# Altium schematic symbol library Mosfet.SchLib: 175 symbols (part 3 of 4)
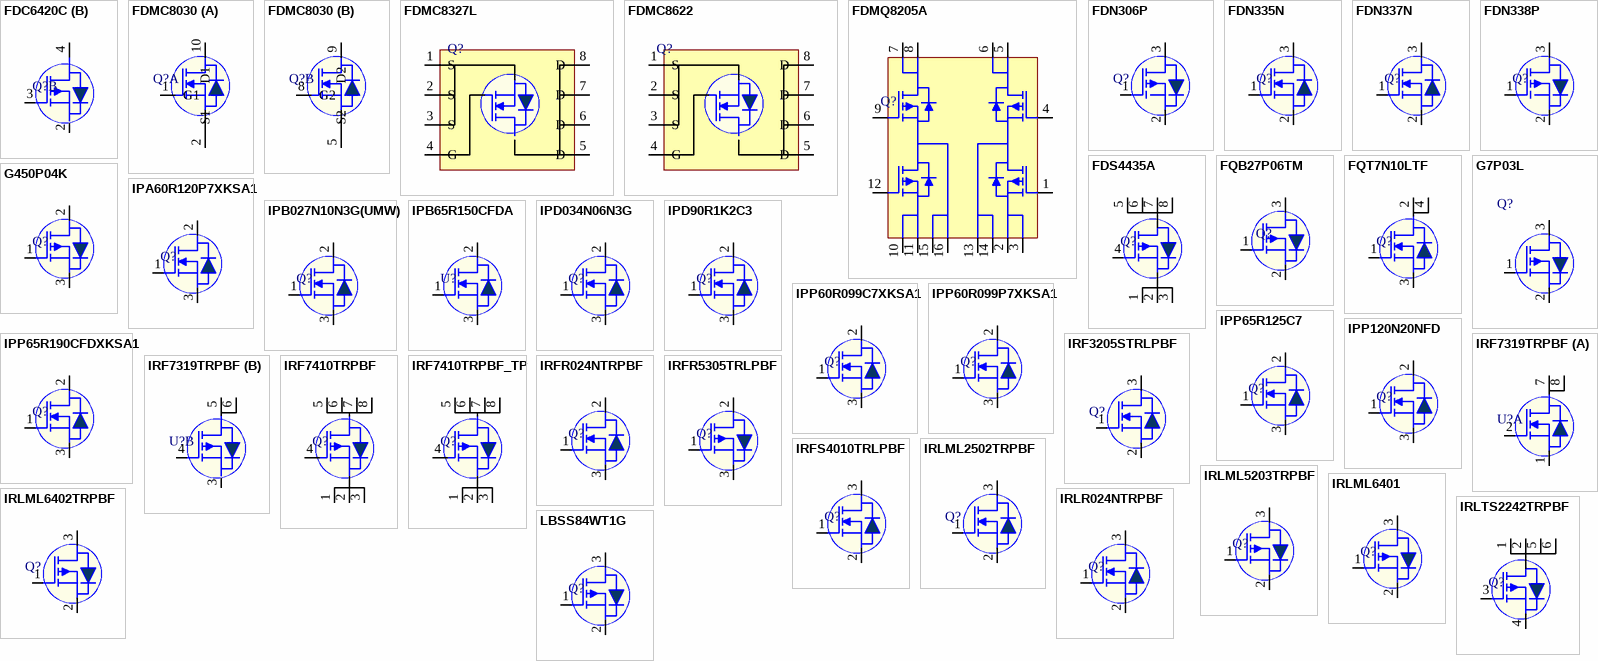
[diagram p6: symbols FDC6420C to LBSS84WT1G]

## FQT7N10LTF
designator Q?
MOSFET N-CH 100V 1.7A SOT223-4; Manufacturer: ON Semiconductor / Fairchild; Manufacturer Part Number: FQT7N10LTF; Item Type: MOSFETs; Supplier: Future Electronics; Supplier Part Number: 9201641; RoHS: Yes; Stock: 188000; Pricing: 4000=0.24, 8000=0.235, 12000=0.235, 16000=0.23, 20000=0.225 (USD); ComponentLink1URL: https://datasheet.ciiva.com/15137/getdatasheetpartid-60091-15137237.pdf?src-supplier=Verical; ComponentLink1Description: https://datasheet.ciiva.com/15137/getdatasheetpartid-60091-15137237.pdf?src-supplier=Verical; ComponentLink2URL: https://datasheet.ciiva.com/8114/fqt7n10l-8114544.pdf?src-supplier=Avnet; ComponentLink2Description: https://datasheet.ciiva.com/8114/fqt7n10l-8114544.pdf?src-supplier=Avnet; ComponentLink3URL: https://datasheet.ciiva.com/4442/fqt7n10l-112492-4442638.pdf?src-supplier=Mouser; ComponentLink3Description: https://datasheet.ciiva.com/4442/fqt7n10l-112492-4442638.pdf?src-supplier=Mouser; ComponentLink4URL: https://datasheet.ciiva.com/27051/933775-27051022.pdf?src-supplier=Jameco; ComponentLink4Description: https://datasheet.ciiva.com/27051/933775-27051022.pdf?src-supplier=Jameco; ComponentLink5URL: https://datasheet.ciiva.com/932/fqt7n10l-932082.pdf?src-supplier=Digikey; ComponentLink5Description: https://datasheet.ciiva.com/932/fqt7n10l-932082.pdf?src-supplier=Digikey; ComponentLink6URL: https://datasheet.ciiva.com/932/fqt7n10l-932083.pdf?src-supplier=Digikey; ComponentLink6Description: https://datasheet.ciiva.com/932/fqt7n10l-932083.pdf?src-supplier=Digikey; ComponentLink7URL: https://datasheet.ciiva.com/932/fqt7n10l-932084.pdf?src-supplier=Digikey; ComponentLink7Description: https://datasheet.ciiva.com/932/fqt7n10l-932084.pdf?src-supplier=Digikey; LCSC Part Number: C154506
footprint SOT- 223
pins: 1 G, 2 D, 3 S, 4 D

## G7P03L
designator Q?
30V 7A 19mΩ 1.9W 1.1V@250uA P Channel SOT-23-3L MOSFETs ROHS; Manufacturer: GoFord; Manufacturer Part Number: G7P03L; Item Type: Mosfet; Supplier 1: Digi-Key; RoHS: No; Category: Uncategorized; Stock 1: 6672; Pricing 1: 1=0.45000, 10=0.36500, 100=0.24860, 500=0.18648, 1000=0.13986 (USD); LCSC Part Number: C840062; ComponentLink1Description: LCSC; ComponentLink1URL: https://www.lcsc.com/product-detail/MOSFETs_GOFORD-G7P03L_C840062.html
footprint SOT-23-3L_
pins: 1 G, 2 S, 3 D

## G450P04K
designator Q?
40V 11A 32mΩ@10V 2.5V 1PCSPChannel TO-252 MOSFETs ROHS; Manufacturer: GoFord; Manufacturer Part Number: G450P04K; Item Type: Mosfet; Supplier: Digikey; LCSC Part Number: C7465407; RoHS: No; Stock: 2033; Pricing: 1=0.41, 10=0.352, 100=0.2446, 500=0.19098, 1000=0.15523 (USD)
footprint TO-252-2L
pins: 1 G, 2 D, 3 S

## IPA60R120P7XKSA1
designator Q?
MOSFET N-CH 600V 26A TO220; Manufacturer: Infineon; Manufacturer Part Number: IPA60R120P7XKSA1; Item Type: MOSFETs; Drain to Source Resistance: 100mR; Gate to Source Voltage (Vgs): 20V; Number of Channels: 1NUMBER; On-State Resistance: 120mR; Power Dissipation: 28W; Turn-Off Delay Time: 81ns; Turn-On Delay Time: 21ns; Supplier: Mouser; Supplier Part Number: 726-IPA60R120P7XKSA1; RoHS: Yes; Stock: 2795; Pricing: 1=2.99, 10=2.59, 50=2.37, 100=2.03, 1000=1.59, 10000=1.39 (USD); Drain to Source Breakdown Voltage: 600V; Package Quantity: 500NUMBER; Height: 18.1mm; ComponentLink1URL: http://datasheet.octopart.com/IPA60R120P7XKSA1-Infineon-datasheet-96908606.pdf?src-supplier=Future+Electronics; ComponentLink1Description: http://datasheet.octopart.com/IPA60R120P7XKSA1-Infineon-datasheet-96908606.pdf?src-supplier=Future+Electronics; ComponentLink2URL: http://datasheet.octopart.com/IPA60R120P7XKSA1-Infineon-datasheet-96908606.pdf?src-supplier=Digikey; ComponentLink2Description: http://datasheet.octopart.com/IPA60R120P7XKSA1-Infineon-datasheet-96908606.pdf?src-supplier=Digikey; ComponentLink3URL: http://datasheet.octopart.com/IPA60R120P7XKSA1-Infineon-datasheet-96908606.pdf?src-supplier=Farnell; ComponentLink3Description: http://datasheet.octopart.com/IPA60R120P7XKSA1-Infineon-datasheet-96908606.pdf?src-supplier=Farnell; ComponentLink4URL: http://datasheet.octopart.com/IPA60R120P7XKSA1-Infineon-datasheet-96908606.pdf?src-supplier=Newark; ComponentLink4Description: http://datasheet.octopart.com/IPA60R120P7XKSA1-Infineon-datasheet-96908606.pdf?src-supplier=Newark; ComponentLink5URL: http://datasheet.octopart.com/IPA60R120P7XKSA1-Infineon-datasheet-96908606.pdf?src-supplier=Avnet; ComponentLink5Description: http://datasheet.octopart.com/IPA60R120P7XKSA1-Infineon-datasheet-96908606.pdf?src-supplier=Avnet; ComponentLink6URL: http://datasheet.octopart.com/IPA60R120P7XKSA1-Infineon-datasheet-96908606.pdf?src-supplier=Rs; ComponentLink6Description: http://datasheet.octopart.com/IPA60R120P7XKSA1-Infineon-datasheet-96908606.pdf?src-supplier=Rs; ComponentLink7URL: http://datasheet.octopart.com/IPA60R120P7XKSA1-Infineon-datasheet-96908606.pdf?src-supplier=Mouser; ComponentLink7Description: http://datasheet.octopart.com/IPA60R120P7XKSA1-Infineon-datasheet-96908606.pdf?src-supplier=Mouser; ComponentLink8URL: https://datasheet.octopart.com/IPA60R120P7XKSA1-Infineon-datasheet-96908606.pdf?src-supplier=TME; ComponentLink8Description: https://datasheet.octopart.com/IPA60R120P7XKSA1-Infineon-datasheet-96908606.pdf?src-supplier=TME; ComponentLink9URL: http://datasheet.octopart.com/IPA60R120P7XKSA1-Infineon-datasheet-96908606.pdf?src-supplier=Rochester+Electronics; ComponentLink9Description: http://datasheet.octopart.com/IPA60R120P7XKSA1-Infineon-datasheet-96908606.pdf?src-supplier=Rochester+Electronics
footprint TO-220-3
pins: 1 G, 2 D, 3 S

## IPB027N10N3G(UMW)
designator Q?
TO-263 MOSFETs ROHS; Manufacturer: UMW; Manufacturer Part Number: IPB027N10N3G(UMW); Item Type: MOSFET; Package: TO-263; LCSC Part Number: C19185922; ComponentLink1Description: LCSC; ComponentLink1URL: https://www.lcsc.com/product-detail/MOSFETs_UMW-Youtai-Semiconductor-Co-Ltd-IPB027N10N3G-UMW_C19185922.html
footprint TO-263
pins: 1 G, 2 D, 3 S

## IPB65R150CFDA
designator U?
MOSFET N-CH 650V 22.4A D2PAK; Manufacturer: Infineon; Manufacturer Part Number: IPB65R150CFDA; Supplier: Future Electronics; LCSC Part Number: C536639; Item Type: Mosfet; Stock: 1000; Pricing: 1000=2.73 (USD); Case/Package: TO-263-3; Pins: 3; Packaging: Tape and Reel; Halogen Free: Halogen Free
footprint TO-263
pins: 1 G, 2 D, 3 S

## IPD034N06N3G
designator Q?
MOSFET N-CH 60V 100A TO252-3; Manufacturer: Infineon; Manufacturer Part Number: IPD034N06N3G; Supplier: Mouser; Supplier Part Number: 726-IPD034N06N3G; RoHS: Yes; Stock: 7587; Pricing: 1=1.76, 10=1.48, 50=1.48, 100=1.2, 1000=0.837, 10000=0.747 (USD); LCSC Part Number: C94897; Item Type: Mosfet
footprint TO-252-2L
pins: 1 G, 2 D, 3 S

## IPD90R1K2C3
designator Q?
900V 5.1A 83W 1.2Ω@10V,2.8A 3.5V 1 N-channel TO-252-3 MOSFETs ROHS; Manufacturer: Infineon; Manufacturer Part Number: IPD90R1K2C3; Item Type: Mosfet; Supplier: Mouser; LCSC Part Number: C386347; RoHS: Yes; Pricing: 1=1.96, 10=1.32, 50=1.32, 100=1.01, 1000=0.802, 10000=0.681 (USD); ComponentLink1URL: https://www.verical.com/server-webapp/html/getDatasheet?partID=419979&src-supplier=Verical; ComponentLink1Description: https://www.verical.com/server-webapp/html/getDatasheet?partID=419979&src-supplier=Verical; ComponentLink2URL: https://datasheet.octopart.com/IPD90R1K2C3-Infineon-datasheet-7537246.pdf?src-supplier=Farnell; ComponentLink2Description: https://datasheet.octopart.com/IPD90R1K2C3-Infineon-datasheet-7537246.pdf?src-supplier=Farnell; ComponentLink3URL: https://datasheet.octopart.com/IPD90R1K2C3ATMA1-Infineon-datasheet-32982626.pdf?src-supplier=Future+Electronics; ComponentLink3Description: https://datasheet.octopart.com/IPD90R1K2C3ATMA1-Infineon-datasheet-32982626.pdf?src-supplier=Future+Electronics
footprint TO-252-2L
pins: 1 G, 2 D, 3 S

## IPP60R099C7XKSA1
designator Q?
MOSFET N-CH 600V 22A TO220-3; Manufacturer: Infineon; Manufacturer Part Number: IPP60R099C7XKSA1; Item Type: MOSFETs; Supplier: Mouser; LCSC Part Number: C537192; RoHS: Yes; Stock: 617; Pricing: 1=5.39, 10=4.84, 50=4.78, 100=4.69, 1000=2.27, 10000=2.27 (USD); ComponentLink1URL: http://www.mouser.com/ds/2/196/Infineon-IPP60R099C7-DS-v02_00-EN-1076845.pdf?src-supplier=Mouser; ComponentLink1Description: http://www.mouser.com/ds/2/196/Infineon-IPP60R099C7-DS-v02_00-EN-1076845.pdf?src-supplier=Mouser; ComponentLink2URL: https://www.infineon.com/dgdl/Infineon-IPP60R099C7-DS-v02_00-EN.pdf?fileId=5546d4624cb7f111014d481216877004&src-supplier=Digikey; ComponentLink2Description: https://www.infineon.com/dgdl/Infineon-IPP60R099C7-DS-v02_00-EN.pdf?fileId=5546d4624cb7f111014d481216877004&src-supplier=Digikey
footprint TO-220-3
pins: 1 G, 2 D, 3 S

## IPP60R099P7XKSA1
designator Q?
MOSFET N-CH 600V 31A TO220-3; Manufacturer: Infineon; Manufacturer Part Number: IPP60R099P7XKSA1; Supplier: Mouser; LCSC Part Number: C672383; RoHS: Yes; Item Type: MOSFET; Stock: 311; Pricing: 1=4.15, 10=3.48, 50=3.29, 100=2.82, 1000=2.14, 10000=2.02 (USD); ComponentLink1URL: https://www.infineon.com/dgdl/Infineon-IPP60R099P7-DS-v02_00-EN.pdf?fileId=5546d4625b10283a015b1979a00e4aaa&src-supplier=Digikey; ComponentLink1Description: https://www.infineon.com/dgdl/Infineon-IPP60R099P7-DS-v02_00-EN.pdf?fileId=5546d4625b10283a015b1979a00e4aaa&src-supplier=Digikey; ComponentLink2URL: https://datasheet.octopart.com/IPP60R099P7XKSA1-Infineon-datasheet-96921537.pdf?src-supplier=TME; ComponentLink2Description: https://datasheet.octopart.com/IPP60R099P7XKSA1-Infineon-datasheet-96921537.pdf?src-supplier=TME
footprint TO-220-3
pins: 1 G, 2 D, 3 S

## IPP65R125C7
designator Q?
MOSFET N-CH 650V 18A TO220-3; Manufacturer: Infineon; Manufacturer Part Number: IPP65R125C7; Supplier: Mouser; RoHS: Yes; Item Type: Mosfet; Pricing: 1=4.05, 10=3.4, 50=2.58, 100=2.35, 1000=1.88, 10000=1.88 (USD); ComponentLink1URL: http://www.farnell.com/datasheets/1812585.pdf?src-supplier=Element14; ComponentLink1Description: http://www.farnell.com/datasheets/1812585.pdf?src-supplier=Element14; ComponentLink2URL: http://www.farnell.com/datasheets/1812585.pdf?src-supplier=Newark; ComponentLink2Description: http://www.farnell.com/datasheets/1812585.pdf?src-supplier=Newark
footprint TO-220-3
pins: 1 G, 2 D, 3 S

## IPP65R190CFDXKSA1
designator Q?
MOSFET N-CH 650V 14A TO220-3; Manufacturer: Infineon; Manufacturer Part Number: IPP65R190CFDXKSA1; Item Type: MOSFETs; On-State Resistance: 190mR; Supplier: Mouser; LCSC Part Number: 726-IPP65R190CFD; RoHS: Yes; Stock: 410; Pricing: 1=3.7, 10=3.11, 50=2.93, 100=2.51, 1000=1.91, 10000=1.8 (USD); Max Dual Supply Voltage: 650V; Lead Free: 5697LeadFree; ComponentLink1URL: https://datasheet.ciiva.com/952/infineon-ipx65r190cfd-ds-v02-07-en-952136.pdf?src-supplier=Digikey; ComponentLink1Description: https://datasheet.ciiva.com/952/infineon-ipx65r190cfd-ds-v02-07-en-952136.pdf?src-supplier=Digikey
footprint TO-220-3
pins: 1 G, 2 D, 3 S

## IPP120N20NFD
designator Q?
MOSFET N-CH 200V 84A TO220-3; Manufacturer: Infineon; Manufacturer Part Number: IPP120N20NFD; Item Type: MOSFETs; Supplier: Future Electronics; LCSC Part Number: C537163; RoHS: Yes; Stock: 2450; Pricing: 50=2.03, 1000=2, 1500=1.98, 2000=1.97, 2500=1.93 (USD); Case/Package: TO-220-3; Pins: 3; Packaging: Rail/Tube; Halogen Free: Halogen Free; Reach SVHC Compliant: Yes; Lead Free: Lead Free; RoHS Compliant: Yes; ComponentLink1URL: http://www.farnell.com/datasheets/1932551.pdf?src-supplier=Element14; ComponentLink1Description: http://www.farnell.com/datasheets/1932551.pdf?src-supplier=Element14
footprint TO-220-3
pins: 1 G, 2 D, 3 S

## IRF3205STRLPBF
designator Q?
MOSFET N-CH 55V 110A D2PAK; Manufacturer: Infineon Technologies; Manufacturer Part Number: IRF3205STRLPBF; Package: D2PAK; ComponentLink1URL: https://www.lcsc.com/product-detail/MOSFETs_Infineon-Technologies-IRF3205STRLPBF_C2613.html; ComponentLink1Description: LCSC; LCSC Part Number: C2613; Item Type: Mosfet
footprint D2Pak.
pins: 1 G, 2 S, 3 D

## IRF7319TRPBF
designator U?
MOSFET N/P-CH 30V 8SOIC; Manufacturer: International Rectifier; Manufacturer Part Number: IRF7319TRPBF; Continuous Drain Current (ID): 6.5A; Gate to Source Voltage (Vgs): 20V; Rise Time: 13ns; Nominal Vgs: 1V; Rds On Max: 29mR; Input Capacitance: 650pF; Number of Elements: 2; Max Power Dissipation: 2W; Drain to Source Resistance: 46mR; Turn-Off Delay Time: 34ns; FET Type: N and P-Channel; Supplier 1: Digi-Key; Stock 1: 0; Pricing 1: 1=1.08, 10=0.968, 25=0.9184, 100=0.7544, 500=0.62316, 1000=0.4991 (USD); Mount: Surface Mount; Case/Package: SOIC; Number of Pins: 8; Min Operating Temperature: -55°C; Max Operating Temperature: 150°C; Packaging: Tape and Reel; Drain to Source Breakdown Voltage: 30V; Current Rating: 6.5A; Package Quantity: 4000; Drain to Source Voltage (Vdss): 30V; Power Dissipation: 2W; Threshold Voltage: 1V; On-State Resistance: 29mR; Series: HEXFET®; Drain-source On Resistance-Max: 29mR; Length: 5mm; Width: 4mm; Height: 1.5mm; Radiation Hardening: No; Lead Free: Lead Free; RoHS Compliant: Yes; REACH SVHC: No SVHC; ComponentLink1URL: http://www.farnell.com/datasheets/137692.pdf?src-supplier=Newark; ComponentLink1Description: http://www.farnell.com/datasheets/137692.pdf?src-supplier=Newark; ComponentLink2URL: https://www.infineon.com/dgdl/irf7319pbf.pdf?fileId=5546d462533600a4015355f5c82f1b41&src-supplier=Digi-Key; ComponentLink2Description: https://www.infineon.com/dgdl/irf7319pbf.pdf?fileId=5546d462533600a4015355f5c82f1b41&src-supplier=Digi-Key; ComponentLink3URL: http://www.irf.com/product-info/datasheets/data/irf7319pbf.pdf?src-supplier=Future+Electronics; ComponentLink3Description: http://www.irf.com/product-info/datasheets/data/irf7319pbf.pdf?src-supplier=Future+Electronics; ComponentLink4URL: http://datasheet.iiic.cc/international_rectifier/IRF7319TRPBF.pdf?src-supplier=IIIC; ComponentLink4Description: http://datasheet.iiic.cc/international_rectifier/IRF7319TRPBF.pdf?src-supplier=IIIC; Supplier Part Number 1: IRF7319PBFCT-ND; LCSC Part Number: C5123893
footprint SOP-8
part A pins: 1 S1, 2 G1, 7 D1, 8 D1
part B pins: 3 S2, 4 G2, 5 D2, 6 D2

## IRF7410TRPBF
designator Q?
MOSFET P-CH 12V 16A 8SO; Manufacturer: Infineon; Manufacturer Part Number: IRF7410TRPBF; Supplier: Mouser; Supplier Part Number: 942-IRF7410TRPBF; RoHS: Yes; Category: MOSFETs; Stock: 296; Pricing: 1=1.13, 10=0.922, 50=0.922, 100=0.716, 1000=0.487, 10000=0.437 (USD); ComponentLink1URL: http://datasheet.octopart.com/IRF7410TRPBF-Infineon-datasheet-8080302.pdf?src-supplier=TME; ComponentLink1Description: http://datasheet.octopart.com/IRF7410TRPBF-Infineon-datasheet-8080302.pdf?src-supplier=TME; LCSC Part Number: C148144; Item Type: MOSFET
footprint SOP-8
pins: 1 S, 2 S, 3 S, 4 G, 5 D, 6 D, 7 D, 8 D

## IRF7410TRPBF_TP
designator Q?
20V 14A 8.5mΩ@4.5V,8A 600mV SOP-8 MOSFETs ROHS; Manufacturer: TECH PUBLIC; Manufacturer Part Number: IRF7410TRPBF; Item Type: Mosfet; Package: SOP-8; LCSC Part Number: C5370971; ComponentLink1Description: LCSC; ComponentLink1URL: https://www.lcsc.com/product-detail/MOSFETs_TECH-PUBLIC-IRF7410TRPBF_C5370971.html?s_z=n_IRF7410TRPBF
footprint SOP-8
pins: 1 S, 2 S, 3 S, 4 G, 5 D, 6 D, 7 D, 8 D

## IRFR024NTRPBF
designator Q?
MOSFET N-CH 55V 17A DPAK; Manufacturer: Infineon; Manufacturer Part Number: IRFR024NTRPBF; Nominal Vgs: 4V; Number of Elements: 1NUMBER; Fall Time: 27ns; Element Configuration: 5460ElementConfiguration; On-State Resistance: 75mR; Value: 75mR; Supplier: Mouser; Supplier Part Number: 942-IRFR024NTRPBF; RoHS: Yes; Item Type: MOSFET; Stock: 51400; Pricing: 1=0.62, 10=0.541, 50=0.541, 100=0.375, 1000=0.294, 10000=0.293 (USD); Current Rating: 17A; Voltage Rating (DC): 55V; Package Quantity: 2000NUMBER; Radiation Hardening: 5898YesNo
footprint DPAK
pins: 1 G, 2 D, 3 S

## IRFR5305TRLPBF
designator Q?
MOSFET P-CH 55V 31A DPAK; Manufacturer: Infineon; Manufacturer Part Number: IRFR5305TRLPBF; Drain to Source Voltage (Vdss): -55V; Max Power Dissipation: 110W; Gate to Source Voltage (Vgs): 20V; Input Capacitance: 1.2nF; Turn-Off Delay Time: 39ns; Turn-On Delay Time: 14ns; Threshold Voltage: -4V; Rds On Max: 65mR; Polarization: P; Supplier: Mouser; Supplier Part Number: 942-IRFR5305TRLPBF; RoHS: Yes; Item Type: MOSFET; Stock: 19036; Pricing: 1=1.28, 10=1.04, 50=1.04, 100=0.821, 1000=0.54, 10000=0.49 (USD); Mounting Technology: Surface Mount; Case/Package: TO-252-3; Pins: 3; Min Operating Temperature: -55°C; Max Operating Temperature: 175°C; Continuous Drain Current (ID): 31A; Power Dissipation: 110W; Packaging: Cut Tape; Drain to Source Breakdown Voltage: -55V; Max Dual Supply Voltage: -55V; Drain to Source Resistance: 65mR; Series: HEXFET®; Length: 0.409inch; Width: 0.265inch; Height: 0.094inch; RoHS Compliant: Yes; Reach SVHC Compliant: No; Lead Free: Contains Lead; Halogen Free: Halogen Free; ComponentLink1URL: http://www.farnell.com/datasheets/274342.pdf?src-supplier=Element14; ComponentLink1Description: http://www.farnell.com/datasheets/274342.pdf?src-supplier=Element14; ComponentLink2URL: http://www.farnell.com/datasheets/139980.pdf?src-supplier=Element14; ComponentLink2Description: http://www.farnell.com/datasheets/139980.pdf?src-supplier=Element14
footprint DPAK
pins: 1 G, 2 D, 3 S

## IRFS4010TRLPBF
designator Q?
MOSFET N-CH 100V 180A D2PAK; Manufacturer: Infineon; Manufacturer Part Number: IRFS4010TRLPBF; Item Type: MOSFETs; Nominal Vgs: 4V; Fall Time: 77ns; Number of Channels: 1NUMBER; On-State Resistance: 4.7mR; Rise Time: 86ns; Supplier: Digikey; LCSC Part Number: C538014; RoHS: Yes; Stock: 25670; Pricing: 1=4.31, 10=2.845, 100=2.0128 (USD); Drain to Source Breakdown Voltage: 100V; Package Quantity: 800NUMBER; Radiation Hardening: 5898YesNo; Reach SVHC Compliant: 4186SVHC; ComponentLink1URL: https://www.alliedelec.com/m/d/2dacadc247c6c1de62d7fe99e87e8f05.pdf?src-supplier=Allied+Electronics; ComponentLink1Description: https://www.alliedelec.com/m/d/2dacadc247c6c1de62d7fe99e87e8f05.pdf?src-supplier=Allied+Electronics; ComponentLink2URL: http://datasheet.octopart.com/IRFS4010TRLPBF-Infineon-datasheet-10857055.pdf?src-supplier=Farnell; ComponentLink2Description: http://datasheet.octopart.com/IRFS4010TRLPBF-Infineon-datasheet-10857055.pdf?src-supplier=Farnell; ComponentLink3URL: http://www.infineon.com/dgdl/irfs4010pbf.pdf?fileId=5546d462533600a401535636cbd72187&src-supplier=Digikey; ComponentLink3Description: http://www.infineon.com/dgdl/irfs4010pbf.pdf?fileId=5546d462533600a401535636cbd72187&src-supplier=Digikey; ComponentLink4URL: https://www.infineon.com/dgdl/irfs4010pbf.pdf?fileId=5546d462533600a401535636cbd72187&src-supplier=Digikey; ComponentLink4Description: https://www.infineon.com/dgdl/irfs4010pbf.pdf?fileId=5546d462533600a401535636cbd72187&src-supplier=Digikey; ComponentLink5URL: http://datasheet.octopart.com/IRFS4010TRLPBF-Infineon-datasheet-10857055.pdf?src-supplier=Digikey; ComponentLink5Description: http://datasheet.octopart.com/IRFS4010TRLPBF-Infineon-datasheet-10857055.pdf?src-supplier=Digikey; ComponentLink6URL: http://datasheet.octopart.com/IRFS4010TRLPBF-Infineon-datasheet-10857055.pdf?src-supplier=Future+Electronics; ComponentLink6Description: http://datasheet.octopart.com/IRFS4010TRLPBF-Infineon-datasheet-10857055.pdf?src-supplier=Future+Electronics; ComponentLink7URL: http://datasheet.octopart.com/IRFS4010TRLPBF-Infineon-datasheet-10857055.pdf?src-supplier=Rs; ComponentLink7Description: http://datasheet.octopart.com/IRFS4010TRLPBF-Infineon-datasheet-10857055.pdf?src-supplier=Rs; ComponentLink8URL: https://datasheet.octopart.com/IRFS4010TRLPBF-Infineon-datasheet-10857055.pdf?src-supplier=Newark; ComponentLink8Description: https://datasheet.octopart.com/IRFS4010TRLPBF-Infineon-datasheet-10857055.pdf?src-supplier=Newark
footprint DPAK
pins: 1 G, 2 S, 3 D

## IRLML2502TRPBF
designator Q?
MOSFET N-CH 20V 4.2A SOT23; Manufacturer: Infineon Technologies; Manufacturer Part Number: IRLML2502TRPBF; Package: SOT-23; ComponentLink2URL: https://www.lcsc.com/product-detail/MOSFETs_Infineon-Technologies-IRLML2502TRPBF_C2589.html; ComponentLink2Description: LCSC; LCSC Part Number: C2589; Item Type: Mosfet
footprint SOT-23 (TRANS NPN 40V 0.6A SOT23)
pins: 1 G, 2 S, 3 D

## IRLML5203TRPBF
designator Q?
MOSFET P-CH 30V 3A MICRO3/SOT23; Manufacturer: Infineon; Manufacturer Part Number: IRLML5203TRPBF; Item Type: MOSFETs; Current Rating: -3A; Dual Supply Voltage: -30V; Fall Time: 52ns; Nominal Vgs: -2.5V; Number of Elements: 1NUMBER; Value: 98MR; Supplier: Future Electronics; LCSC Part Number: C2592; RoHS: Yes; Stock: 411000; Pricing: 3000=0.0924, 9000=0.0889, 15000=0.0873, 30000=0.0852, 60000=0.0819 (USD); Termination: 4890ConnectorType; Voltage Rating (DC): -30V; On-State Resistance: 98mR; Package Quantity: 3000NUMBER; Radiation Hardening: 5898YesNo; ComponentLink1URL: http://www.farnell.com/datasheets/1911632.pdf?src-supplier=Farnell; ComponentLink1Description: http://www.farnell.com/datasheets/1911632.pdf?src-supplier=Farnell; ComponentLink2URL: https://www.alliedelec.com/m/d/09a4562f0d5f53db2016a9723f6a9233.pdf?src-supplier=Allied+Electronics; ComponentLink2Description: https://www.alliedelec.com/m/d/09a4562f0d5f53db2016a9723f6a9233.pdf?src-supplier=Allied+Electronics; ComponentLink3URL: https://www.infineon.com/dgdl/irlml5203pbf.pdf?fileId=5546d462533600a40153566868da261d&src-supplier=Digikey; ComponentLink3Description: https://www.infineon.com/dgdl/irlml5203pbf.pdf?fileId=5546d462533600a40153566868da261d&src-supplier=Digikey; ComponentLink4URL: http://www.infineon.com/dgdl/irlml5203pbf.pdf?fileId=5546d462533600a40153566868da261d&src-supplier=Digikey; ComponentLink4Description: http://www.infineon.com/dgdl/irlml5203pbf.pdf?fileId=5546d462533600a40153566868da261d&src-supplier=Digikey; ComponentLink5URL: http://www.farnell.com/datasheets/1911632.pdf?src-supplier=Newark; ComponentLink5Description: http://www.farnell.com/datasheets/1911632.pdf?src-supplier=Newark; ComponentLink6URL: http://www.farnell.com/datasheets/1911632.pdf?src-supplier=Element14; ComponentLink6Description: http://www.farnell.com/datasheets/1911632.pdf?src-supplier=Element14; ComponentLink7URL: https://datasheet.octopart.com/IRLML5203TRPBF-Infineon-datasheet-10898946.pdf?src-supplier=Element14; ComponentLink7Description: https://datasheet.octopart.com/IRLML5203TRPBF-Infineon-datasheet-10898946.pdf?src-supplier=Element14
footprint SOT-23 (TRANS NPN 40V 0.6A SOT23)
pins: 1 G, 2 S, 3 D

## IRLML6401
designator Q?
SOT-23 MOSFETs ROHS; Manufacturer: BORN; Manufacturer Part Number: IRLML6401; Item Type: MOSFET; Package: SOT-23; LCSC Part Number: C5148469; ComponentLink1Description: LCSC; ComponentLink1URL: https://www.lcsc.com/product-detail/MOSFETs_BORN-IRLML6401_C5148469.html
footprint SOT-23 (TRANS NPN 40V 0.6A SOT23)
pins: 1 G, 2 S, 3 D

## IRLML6402TRPBF
designator Q?
MOSFET P-CH 20V 3.7A SOT23; Manufacturer: International Rectifier; Manufacturer Part Number: IRLML6402TRPBF; Package: SOT-23; LCSC Part Number: C5182043; Item Type: Mosfet; ComponentLink11Description: LCSC; ComponentLink11URL: https://www.lcsc.com/product-detail/MOSFETs_TECH-PUBLIC-IRLML6402TRPBF_C5182043.html
footprint SOT-23 (TRANS NPN 40V 0.6A SOT23)
pins: 1 G, 2 S, 3 D

## IRLR024NTRPBF
designator Q?
MOSFET N-CH 55V 17A DPAK; Manufacturer: Infineon; Manufacturer Part Number: IRLR024NTRPBF; Item Type: MOSFETs; Nominal Vgs: 2V; Number of Elements: 1NUMBER; Rise Time: 74ns; Fall Time: 29ns; Element Configuration: 5460ElementConfiguration; On-State Resistance: 65mR; Value: 80mR; Supplier: Arrow Electronics; LCSC Part Number: C3007; RoHS: Yes; Stock: 96000; Pricing: 2000=0.2743, 4000=0.2526, 10000=0.25, 24000=0.2048 (USD); Current Rating: 17A; Voltage Rating (DC): 55V; Package Quantity: 2000NUMBER; Number of Channels: 1NUMBER; Radiation Hardening: 5898YesNo
footprint DPAK
pins: 1 G, 2 S, 3 D

## IRLTS2242TRPBF
designator Q?
MOSFET P-CH 20V 6.9A 6TSOP; Manufacturer: Infineon; Manufacturer Part Number: IRLTS2242TRPBF; Item Type: MOSFETs; Turn-Off Delay Time: 18ns; Turn-On Delay Time: 5.8ns; Drain to Source Breakdown Voltage: -20V; Drain to Source Resistance: 26mR; Element Configuration: 5460ElementConfiguration; Fall Time: 68ns; Number of Channels: 1NUMBER; On-State Resistance: -32mR; Power Dissipation: 2W; Value: 55MR; Supplier: Mouser; LCSC Part Number: C538190; RoHS: Yes; Stock: 67736; Pricing: 1=0.44, 10=0.372, 50=0.372, 100=0.259, 1000=0.164, 10000=0.129 (USD); Number of Elements: 1NUMBER; Package Quantity: 3000NUMBER; Length: 3mm; Width: 1.75mm; Height: 1.3mm; Radiation Hardening: 5898YesNo; ComponentLink1URL: http://www.farnell.com/datasheets/1911990.pdf?src-supplier=Farnell; ComponentLink1Description: http://www.farnell.com/datasheets/1911990.pdf?src-supplier=Farnell; ComponentLink2URL: http://www.farnell.com/datasheets/1911990.pdf?src-supplier=Element14; ComponentLink2Description: http://www.farnell.com/datasheets/1911990.pdf?src-supplier=Element14; ComponentLink3URL: https://datasheet.octopart.com/IRLTS2242TRPBF-Infineon-datasheet-41193307.pdf?src-supplier=Newark; ComponentLink3Description: https://datasheet.octopart.com/IRLTS2242TRPBF-Infineon-datasheet-41193307.pdf?src-supplier=Newark; ComponentLink4URL: https://www.infineon.com/dgdl/irlts2242pbf.pdf?fileId=5546d462533600a401535671e9a12718&src-supplier=Digikey; ComponentLink4Description: https://www.infineon.com/dgdl/irlts2242pbf.pdf?fileId=5546d462533600a401535671e9a12718&src-supplier=Digikey; ComponentLink5URL: https://datasheet.octopart.com/IRLTS2242TRPBF-Infineon-datasheet-11534477.pdf?src-supplier=Farnell; ComponentLink5Description: https://datasheet.octopart.com/IRLTS2242TRPBF-Infineon-datasheet-11534477.pdf?src-supplier=Farnell
footprint 6-TSOP_
pins: 1 D, 2 D, 3 G, 4 S, 5 D, 6 D

## LBSS84WT1G
designator Q?
50V 130mA 5Ω@10V,100mA 225mW 2V@250uA 1 Piece P-Channel SC-70 MOSFETs ROHS; Manufacturer: LRC; Manufacturer Part Number: LBSS84WT1G; Package: SC-70; LCSC Part Number: C383208; Item Type: MOSFETs; ComponentLink1Description: LCSC; ComponentLink1URL: https://www.lcsc.com/product-detail/MOSFETs_LRC-LBSS84WT1G_C383208.html
footprint SC-70
pins: 1 G, 2 S, 3 D

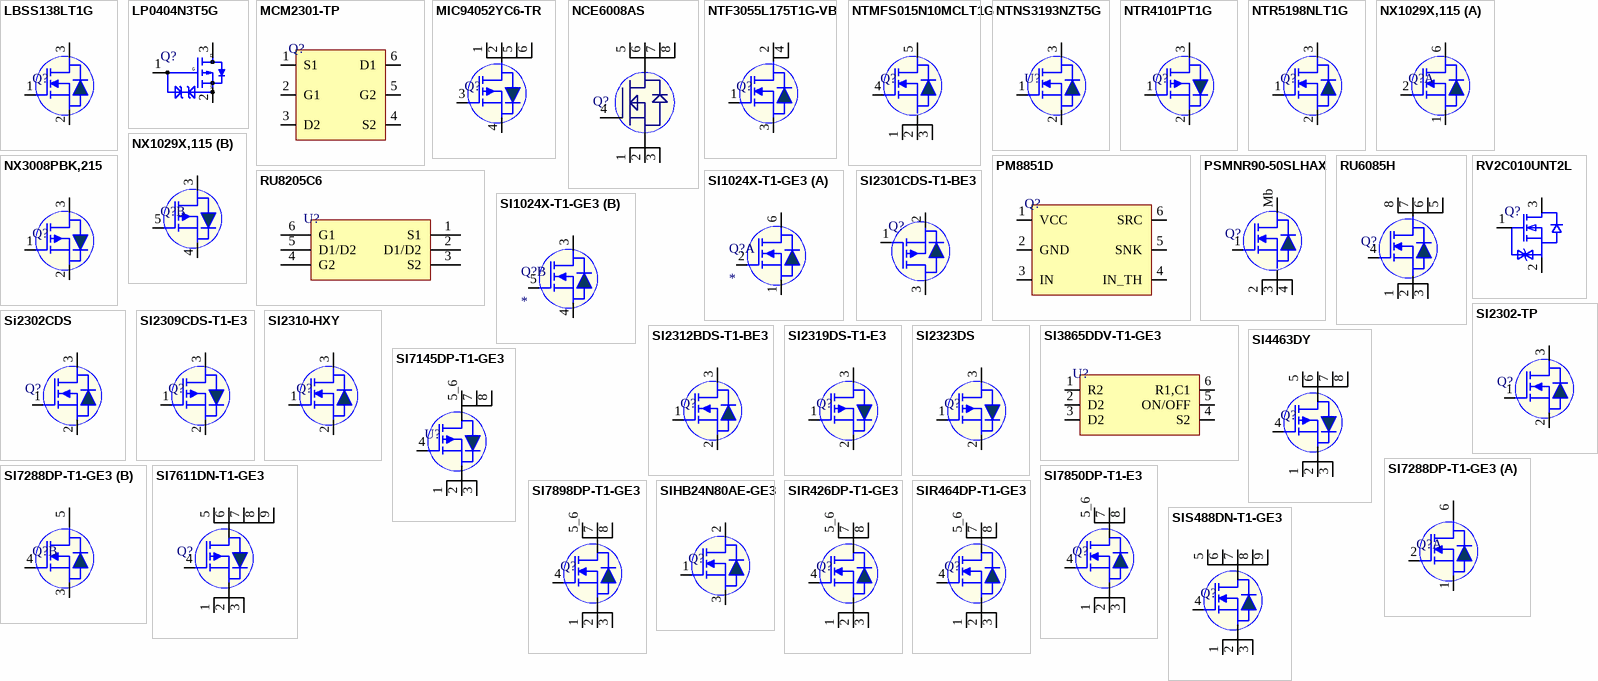
[diagram p3: symbols LBSS138LT1G to SIS488DN-T1-GE3]

## LBSS138LT1G
designator Q?
50V 0.2A 225mW 3.5Ω@5V,200mA N Channel SOT-23 MOSFETs ROHS; Manufacturer: LRC; Manufacturer Part Number: LBSS138LT1G; Item Type: Mosfet; Package: SOT-23; LCSC Part Number: C8490; ComponentLink1Description: LCSC; ComponentLink1URL: https://www.lcsc.com/product-detail/MOSFETs_LRC-LBSS138LT1G_C8490.html
footprint SOT-23 (TRANS NPN 40V 0.6A SOT23)
pins: 1 G, 2 S, 3 D

## LP0404N3T5G
designator Q?
20V 1.4A 0.48Ω@4.5V,780mA 1.2V 1 piece P-channel SOT-883-3 MOSFETs ROHS; Manufacturer: LRC; Manufacturer Part Number: LP0404N3T5G; Item Type: Mosfet; Package: SOT-883-3; LCSC Part Number: C172433; ComponentLink1Description: LCSC; ComponentLink1URL: https://www.lcsc.com/product-detail/MOSFETs_LRC-LP0404N3T5G_C172433.html
footprint SOT-883-3
pins: 1 G, 2 S, 3 D

## MCM2301-TP
designator Q?
MOSFET P-Ch -20Vds -3.8A 10Vgs -13A Idm 1.4W; Manufacturer: MCC; Manufacturer Part Number: MCM2301-TP; Drain to Source Voltage (Vdss): 20V; Continuous Drain Current (ID): 3.8A; Rds On Max: 70mR; Input Capacitance: 880pF; Supplier: Arrow Electronics; Supplier Part Number: MCM2301-TP; RoHS: Yes; Item Type: Mosfet; Stock: 12000; Pricing: 3000=0.0891, 6000=0.0844, 9000=0.0776, 15000=0.0744, 21000=0.0693, 30000=0.0679 (USD); Mounting Technology: Surface Mount; Min Operating Temperature: -55°C; Max Operating Temperature: 150°C; Packaging: Cut Tape; Max Power Dissipation: 1.4W; Series: -; RoHS Compliant: Yes; ComponentLink1URL: http://www.mccsemi.com/up_pdf/MCM2301(DFN2020-6L)-A.pdf?src-supplier=Digikey; ComponentLink1Description: http://www.mccsemi.com/up_pdf/MCM2301(DFN2020-6L)-A.pdf?src-supplier=Digikey
footprint DFN2020-6L
pins: 1 S1, 2 G1, 3 D2, 4 S2, 5 G2, 6 D1

## MIC94052YC6-TR
designator Q?
MOSFET P-CH 6V 2A SC70-6; Manufacturer: Microchip; Manufacturer Part Number: MIC94052YC6-TR; Item Type: MOSFETs; Current Rating: -2A; Number of Channels: 1NUMBER; Voltage Rating (DC): -6V; Supplier: Arrow Electronics; Supplier Part Number: MIC94052YC6-TR; RoHS: Yes; Stock: 2050; Pricing: 1=0.6385, 10=0.6355, 25=0.6341, 100=0.6326, 250=0.6312, 500=0.6298, 1000=0.6284 (USD); Lead Free: 5697LeadFree; ComponentLink1URL: https://datasheet.ciiva.com/15200/getdatasheetpartid-551684-15200794.pdf?src-supplier=Verical; ComponentLink1Description: https://datasheet.ciiva.com/15200/getdatasheetpartid-551684-15200794.pdf?src-supplier=Verical; ComponentLink2URL: https://datasheet.ciiva.com/16222/mic94052-53-16222089.pdf?src-supplier=Future+Electronics; ComponentLink2Description: https://datasheet.ciiva.com/16222/mic94052-53-16222089.pdf?src-supplier=Future+Electronics; ComponentLink3URL: https://datasheet.ciiva.com/6369/mic94052-53-6369221.pdf?src-supplier=Digikey; ComponentLink3Description: https://datasheet.ciiva.com/6369/mic94052-53-6369221.pdf?src-supplier=Digikey; ComponentLink4URL: https://datasheet.ciiva.com/6369/mic94052-53-6369224.pdf?src-supplier=Digikey; ComponentLink4Description: https://datasheet.ciiva.com/6369/mic94052-53-6369224.pdf?src-supplier=Digikey
footprint SC-70-6
pins: 1 D, 2 D, 3 G, 4 S, 5 D, 6 D

## NCE6008AS
designator Q?
60V 8A 2.1W 20mΩ@10V,8A 2.2V@250uA N Channel SOP-8 MOSFETs ROHS; Manufacturer: Wuxi; Manufacturer Part Number: NCE6008AS; Package: SOP-8; ComponentLink1Description: LCSC; ComponentLink1URL: https://www.lcsc.com/product-detail/MOSFETs_Wuxi-span-style-background-color-ff0-NCE-span-Power-Semiconductor-NCE6008AS_C341716.html; LCSC Part Number: C341716
footprint SOP-8
pins: 1 S, 2 S, 3 S, 4 G, 5 D, 6 D, 7 D, 8 D

## NTF3055L175T1G-VB
designator Q?
60V 4A 1PCSNChannel SOT-223 MOSFETs ROHS; Manufacturer: VBsemi Elec; Manufacturer Part Number: NTF3055L175T1G-VB; Item Type: MOSFET; Package: SOT-223; LCSC Part Number: C7494559; ComponentLink1Description: LCSC; ComponentLink1URL: https://www.lcsc.com/product-detail/MOSFETs_VBsemi-Elec-NTF3055L175T1G-VB_C7494559.html
footprint SOT- 223
pins: 1 G, 2 D, 3 S, 4 D

## NTMFS015N10MCLT1G
designator Q?
MOSFET N-CH 100V 10.5A/54A 5DFN; Manufacturer: ON Semiconductor; Manufacturer Part Number: NTMFS015N10MCLT1G; Continuous Drain Current (ID): 10.5A; Drain to Source Resistance: 9.7mR; Gate to Source Voltage (Vgs): 20V; Number of Channels: 1NUMBER; Power Dissipation: 3W; Turn-Off Delay Time: 25ns; Turn-On Delay Time: 9ns; Supplier: Digikey; LCSC Part Number: C900259; RoHS: Yes; Item Type: MOSFET; Stock: 1932; Pricing: 1=1.42, 10=1.161, 100=0.9033, 500=0.76568 (USD); Min Operating Temperature: -55°C; Max Operating Temperature: 175°C; Drain to Source Breakdown Voltage: 100V; Drain to Source Voltage (Vdss): 100V; Height: 1.1mm
footprint 5-DFN (5x6)
pins: 1 S, 2 S, 3 S, 4 G, 5 D

## NTNS3193NZT5G
designator U?
MOSFET N-CH 20V 224MA 3XLLGA; Manufacturer: ON Semiconductor; Manufacturer Part Number: NTNS3193NZT5G; Item Type: IC; Supplier: Avnet; Supplier Part Number: NTNS3193NZT5G; RoHS: Yes; Category: MOSFETs; Stock: 720374; Pricing: 1405=0.26344, 1500=0.25632, 2900=0.2492, 7100=0.24208, 15000=0.23496, 71000=0.22784, 150000=0.22072 (USD); ComponentLink1URL: https://datasheet.ciiva.com/24010/ntns3193nz-d-260351-24010388.pdf?src-supplier=Mouser; ComponentLink1Description: https://datasheet.ciiva.com/24010/ntns3193nz-d-260351-24010388.pdf?src-supplier=Mouser; ComponentLink2URL: https://datasheet.ciiva.com/30022/ntns3193nz-d-30022416.pdf?src-supplier=Avnet; ComponentLink2Description: https://datasheet.ciiva.com/30022/ntns3193nz-d-30022416.pdf?src-supplier=Avnet; LCSC Part Number: C179628
footprint X-LLGA-3
pins: 1 G, 2 S, 3 D

## NTR4101PT1G
designator Q?
MOSFET P-CH 20V 1.8A SOT23-3; Manufacturer: ON Semiconductor; Manufacturer Part Number: NTR4101PT1G; Item Type: MOSFETs; Current Rating: -3.2A; Voltage Rating (DC): -20V; Number of Channels: 1NUMBER; Supplier: Future Electronics; LCSC Part Number: C35920; RoHS: Yes; Stock: 225000; Pricing: 3000=0.0447, 9000=0.0436, 15000=0.0431, 45000=0.0421, 75000=0.0412 (USD); Lead Free: 5697LeadFree; ComponentLink1URL: https://datasheet.ciiva.com/17009/0900766b80dad822-17009068.pdf?src-supplier=Allied+Electronics; ComponentLink1Description: https://datasheet.ciiva.com/17009/0900766b80dad822-17009068.pdf?src-supplier=Allied+Electronics; ComponentLink2URL: https://datasheet.ciiva.com/22641/1708314-22641689.pdf?src-supplier=Element14; ComponentLink2Description: https://datasheet.ciiva.com/22641/1708314-22641689.pdf?src-supplier=Element14; ComponentLink3URL: https://datasheet.ciiva.com/34303/2017033-34303870.pdf?src-supplier=Jameco; ComponentLink3Description: https://datasheet.ciiva.com/34303/2017033-34303870.pdf?src-supplier=Jameco; ComponentLink4URL: https://datasheet.ciiva.com/8114/ntr4101p-d-8114939.pdf?src-supplier=Avnet; ComponentLink4Description: https://datasheet.ciiva.com/8114/ntr4101p-d-8114939.pdf?src-supplier=Avnet; ComponentLink5URL: https://datasheet.ciiva.com/11168/ntr4101p-d-11168185.pdf?src-supplier=Avnet; ComponentLink5Description: https://datasheet.ciiva.com/11168/ntr4101p-d-11168185.pdf?src-supplier=Avnet; ComponentLink6URL: https://datasheet.ciiva.com/936/ntr4101p-d-936839.pdf?src-supplier=Digikey; ComponentLink6Description: https://datasheet.ciiva.com/936/ntr4101p-d-936839.pdf?src-supplier=Digikey; ComponentLink7URL: https://datasheet.ciiva.com/936/ntr4101p-d-936840.pdf?src-supplier=Digikey; ComponentLink7Description: https://datasheet.ciiva.com/936/ntr4101p-d-936840.pdf?src-supplier=Digikey; ComponentLink8URL: https://datasheet.ciiva.com/936/ntr4101p-d-936841.pdf?src-supplier=Digikey; ComponentLink8Description: https://datasheet.ciiva.com/936/ntr4101p-d-936841.pdf?src-supplier=Digikey; ComponentLink9URL: https://datasheet.ciiva.com/16208/ntr4101p-d-16208809.pdf?src-supplier=Future+Electronics; ComponentLink9Description: https://datasheet.ciiva.com/16208/ntr4101p-d-16208809.pdf?src-supplier=Future+Electronics
footprint SOT-23 (TRANS NPN 40V 0.6A SOT23)
pins: 1 G, 2 S, 3 D

## NTR5198NLT1G
designator Q?
SOT-23 MOSFETs ROHS; Manufacturer: TECH PUBLIC; Manufacturer Part Number: NTR5198NLT1G; Item Type: MOSFET; Package: SOT-23; LCSC Part Number: C5122029; ComponentLink1Description: LCSC; ComponentLink1URL: https://www.lcsc.com/product-detail/MOSFETs_TECH-PUBLIC-NTR5198NLT1G_C5122029.html
footprint SOT-23 (TRANS NPN 40V 0.6A SOT23)
pins: 1 G, 2 S, 3 D

## NX1029X,115
designator Q?
MOSFET N/P-CH 60V 0.33A SOT666; Manufacturer: Nexperia; Manufacturer Part Number: NX1029X,115; Item Type: MOSFETs; Continuous Drain Current (ID): 170mA; Drain to Source Breakdown Voltage: -50V; Drain to Source Voltage (Vdss): 50V; Fall Time: 25ns; Gate to Source Voltage (Vgs): 20V; Input Capacitance: 36pF; Max Power Dissipation: 500mW; Number of Elements: 2NUMBER; Rds On Max: 7.5R; Rise Time: 11ns; Supplier: Future Electronics; LCSC Part Number: C489243; RoHS: Yes; Stock: 248000; Pricing: 4000=0.0692, 12000=0.0666, 16000=0.0659, 40000=0.0638, 60000=0.0618 (USD); Case/Package: 73Case; Pins: 6NUMBER; Min Operating Temperature: -55°C; Max Operating Temperature: 150°C; Packaging: 10Packaging; Power Dissipation: 500mW; Radiation Hardening: 5898YesNo; Lead Free: 5697LeadFree; ComponentLink1URL: https://datasheet.octopart.com/NX1029X%2C115-Nexperia-datasheet-87843517.pdf?src-supplier=Future+Electronics; ComponentLink1Description: https://datasheet.octopart.com/NX1029X%2C115-Nexperia-datasheet-87843517.pdf?src-supplier=Future+Electronics; ComponentLink2URL: https://assets.nexperia.com/documents/data-sheet/NX1029X.pdf?src-supplier=Digikey; ComponentLink2Description: https://assets.nexperia.com/documents/data-sheet/NX1029X.pdf?src-supplier=Digikey; ComponentLink3URL: http://www.farnell.com/datasheets/2058265.pdf?src-supplier=Newark; ComponentLink3Description: http://www.farnell.com/datasheets/2058265.pdf?src-supplier=Newark
footprint SOT-666
part A pins: 1 S1, 2 G1, 6 D1
part B pins: 3 D2, 4 S2, 5 G2

## NX3008PBK,215
designator Q?
MOSFET P-CH 30V 230MA TO236AB; Manufacturer: NXP Semiconductors; Manufacturer Part Number: NX3008PBK215; Rds On Max: 4.1R; Input Capacitance: 46pF; Max Dual Supply Voltage: -30V; Max Power Dissipation: 350mW; Supplier: Avnet; Supplier Part Number: NX3008PBK215; RoHS: Yes; Category: Uncategorized; Case/Package: SOT; Pins: 3; Min Operating Temperature: -55°C; Max Operating Temperature: 150°C; Packaging: Tape and Reel; Drain to Source Voltage (Vdss): -30V; Continuous Drain Current (ID): 230mA; Package Quantity: 3000; Series: Automotive, AEC-Q101, TrenchMOS™; Lead Free: Lead Free; ComponentLink1URL: https://datasheet.ciiva.com/29756/nx3008pbk-29756363.pdf?src-supplier=Digikey; ComponentLink1Description: https://datasheet.ciiva.com/29756/nx3008pbk-29756363.pdf?src-supplier=Digikey; LCSC Part Number: C131670; Item Type: Mosfet
footprint SOT-23 (TRANS NPN 40V 0.6A SOT23)
pins: 1 G, 2 S, 3 D

## PM8851D
designator Q?
IC GATE DRVR LOW-SIDE SOT23-6; Manufacturer: STMicroelectronics; Manufacturer Part Number: PM8851D; Supplier: Mouser; LCSC Part Number: C2971234; RoHS: Yes; Stock: 15305; Pricing: 1=0.83, 10=0.537, 50=0.537, 100=0.44, 1000=0.405, 10000=0.341 (USD); ComponentLink1URL: http://www.st.com/content/ccc/resource/technical/document/datasheet/group3/2f/81/d0/59/c5/1d/48/68/DM00140981/files/DM00140981.pdf/jcr:content/translations/en.DM00140981.pdf?src-supplier=Digikey; ComponentLink1Description: http://www.st.com/content/ccc/resource/technical/document/datasheet/group3/2f/81/d0/59/c5/1d/48/68/DM00140981/files/DM00140981.pdf/jcr:content/translations/en.DM00140981.pdf?src-supplier=Digikey; ComponentLink2URL: http://www.st.com/st-web-ui/static/active/en/resource/technical/document/datasheet/DM00140981.pdf?src-supplier=Avnet; ComponentLink2Description: http://www.st.com/st-web-ui/static/active/en/resource/technical/document/datasheet/DM00140981.pdf?src-supplier=Avnet
footprint SOT-23-6
pins: 1 VCC, 2 GND, 3 IN, 4 IN_TH, 5 SNK, 6 SRC

## PSMNR90-50SLHAX
designator Q?
N-Channel 50 V 410A (Tc) 375W (Tc) Surface Mount LFPAK88 (SOT1235); Manufacturer: Nexperia; Manufacturer Part Number: PSMNR90-50SLHAX; Item Type: Mosfet; Supplier: Digikey; Supplier Part Number: 1727-PSMNR90-50SLHAXCT-ND; RoHS: No; Stock: 3956; Pricing: 1=5.86, 10=4.924, 100=3.9834, 500=3.54078, 1000=3.0318 (USD)
footprint LFPAK88 (SOT1235)
pins: 1 G, 2 S, 3 S, 4 S, Mb D

## RU6085H
designator Q?
60V 80A 2.5W 7mΩ@10V,20A 3V@250μA N Channel SOP-8_150mil MOSFETs ROHS; Manufacturer: Shenzhen; Manufacturer Part Number: RU6085H; Item Type: Mosfet; Package: SOP-8_150mil; ComponentLink1Description: LCSC; ComponentLink1URL: https://lcsc.com/product-detail/MOSFETs_Shenzhen-ruichips-Semicon-RU6085H_C181990.html; LCSC Part Number: C181990
footprint SOP-8
pins: 1 S, 2 S, 3 S, 4 G, 5 D, 6 D, 7 D, 8 D

## RU8205C6
designator U?
20V 6A 1.25W 22mΩ@4.5V,6A 2 N-Channel SOT-23-6 MOSFETs ROHS; Manufacturer: Shenzhen ruichips Semicon; Manufacturer Part Number: RU8205C6; Item Type: IC; Package: SOT-23-6; LCSC Part Number: C94488; ComponentLink1Description: LCSC; ComponentLink1URL: https://www.lcsc.com/product-detail/MOSFETs_Shenzhen-ruichips-Semicon-RU8205C6_C94488.html
footprint SOT-23-6
pins: 1 S1, 2 D1/D2, 3 S2, 4 G2, 5 D1/D2, 6 G1

## RV2C010UNT2L
designator Q?
MOSFET N-CH 20V 1A DFN1006-3; Manufacturer: Rohm; Manufacturer Part Number: RV2C010UNT2L; Item Type: MOSFETs; Drain to Source Resistance: 340mR; Supplier: Mouser; LCSC Part Number: C570828; RoHS: Yes; Stock: 16470; Pricing: 1=0.42, 10=0.261, 50=0.261, 100=0.123, 1000=0.086, 10000=0.073 (USD); ComponentLink1URL: http://www.mouser.com/ds/2/348/rv2c010un-e-1139137.pdf?src-supplier=Mouser; ComponentLink1Description: http://www.mouser.com/ds/2/348/rv2c010un-e-1139137.pdf?src-supplier=Mouser; ComponentLink2URL: http://www.farnell.com/datasheets/1945594.pdf?src-supplier=Farnell; ComponentLink2Description: http://www.farnell.com/datasheets/1945594.pdf?src-supplier=Farnell; ComponentLink3URL: https://www.rohm.com/datasheet/RV2C010UN/rv2c010un-e?src-supplier=Digikey; ComponentLink3Description: https://www.rohm.com/datasheet/RV2C010UN/rv2c010un-e?src-supplier=Digikey; ComponentLink4URL: http://rohmfs.rohm.com/en/techdata_basic/transistor/taping/VML1006_T2L_taping.pdf?src-supplier=Digikey; ComponentLink4Description: http://rohmfs.rohm.com/en/techdata_basic/transistor/taping/VML1006_T2L_taping.pdf?src-supplier=Digikey; ComponentLink5URL: http://rohmfs.rohm.com/en/products/databook/datasheet/discrete/transistor/mosfet/rv2c010unt2l.pdf?src-supplier=Avnet; ComponentLink5Description: http://rohmfs.rohm.com/en/products/databook/datasheet/discrete/transistor/mosfet/rv2c010unt2l.pdf?src-supplier=Avnet; ComponentLink6URL: https://datasheet.octopart.com/RV2C010UNT2L-Rohm-datasheet-57364635.pdf?src-supplier=Element14; ComponentLink6Description: https://datasheet.octopart.com/RV2C010UNT2L-Rohm-datasheet-57364635.pdf?src-supplier=Element14
footprint DFN1006-3
pins: 1 G, 2 S, 3 D

## SI1024X-T1-GE3
designator Q?
Mosfet 2 N-Channel 20V 485mA 250mW Surface Mount SC-89 (SOT-563F); Manufacturer: Vishay Intertech; Manufacturer Part Number: SI1024X-T1-GE3; Package: SOT-563; LCSC Part Number: C86784; Item Type: Mosfet; ComponentLink1Description: Link; ComponentLink1URL: https://www.lcsc.com/product-detail/MOSFETs_Vishay-Intertech-SI1024X-T1-GE3_C86784.html
footprint SOT-563
part A pins: 1 S1, 2 G1, 6 D1
part B pins: 3 D2, 4 S2, 5 G2

## SI2301CDS-T1-BE3
designator Q?
Transistor MOSFET P-CH 20V 3.1A 3-Pin SOT-23; Manufacturer: Vishay; Manufacturer Part Number: SI2301CDS-T1-BE3; Continuous Drain Current (ID): -2.3A; Drain to Source Breakdown Voltage: -20V; Drain to Source Resistance: 90mR; Gate to Source Voltage (Vgs): 8V; Number of Channels: 1NUMBER; Power Dissipation: 860mW; Turn-Off Delay Time: 30ns; Turn-On Delay Time: 11ns; Supplier: Digikey; Supplier Part Number: 742-SI2301CDS-T1-BE3CT-ND; RoHS: Yes; Category: MOSFETs; Stock: 6842; Pricing: 1=0.37, 10=0.289, 100=0.1734, 500=0.1606, 1000=0.1092 (USD); Min Operating Temperature: -55°C; Max Operating Temperature: 150°C; Drain to Source Voltage (Vdss): -20V; Height: 1.12mm
footprint SOT-23 (TRANS NPN 40V 0.6A SOT23)
pins: 1 G, 2 S, 3 D

## SI2302-TP
designator Q?
SI2302 Series 20 3 A N-Ch Enhancement Mode Field Effect Transistor - SOT-23-3; Manufacturer: MCC; Manufacturer Part Number: SI2302-TP; Rds On Max: 72mR; Input Capacitance: 237pF; Drain to Source Voltage (Vdss): 20V; Continuous Drain Current (ID): 3A; Max Power Dissipation: 1.25W; Drain to Source Resistance: 110mR; Number of Elements: 1; Gate to Source Voltage (Vgs): 8V; Polarity: N-CHANNEL; Supplier 1: Digi-Key; RoHS: Yes; Category: Transistors; Stock 1: 13753; Pricing 1: 1=0.50000, 10=0.40300, 100=0.27460, 500=0.20592, 1000=0.15444 (USD); Mount: Surface Mount; Case/Package: SOT-23; Number of Pins: 3; Min Operating Temperature: -55°C; Max Operating Temperature: 150°C; Packaging: Tape and Reel; Package Quantity: 3000; Drain to Source Breakdown Voltage: 20V; Power Dissipation: 1.25W; Lead Free: Lead Free; RoHS Compliant: Yes; ComponentLink1URL: https://datasheet.ciiva.com/935/si2302sot-23-935107.pdf?src-supplier=Digi-Key; ComponentLink1Description: https://datasheet.ciiva.com/935/si2302sot-23-935107.pdf?src-supplier=Digi-Key; ComponentLink2URL: https://datasheet.ciiva.com/935/si2302sot-23-935109.pdf?src-supplier=Digi-Key; ComponentLink2Description: https://datasheet.ciiva.com/935/si2302sot-23-935109.pdf?src-supplier=Digi-Key; ComponentLink3URL: https://datasheet.ciiva.com/935/si2302sot-23-935108.pdf?src-supplier=Digi-Key; ComponentLink3Description: https://datasheet.ciiva.com/935/si2302sot-23-935108.pdf?src-supplier=Digi-Key; Supplier Part Number 1: SI2302-TPMSCT-ND; LCSC Part Number: C77977
footprint SOT-23 (TRANS NPN 40V 0.6A SOT23)
pins: 1 G, 2 S, 3 D

## Si2302CDS
designator Q?
N-CHANNEL 20-V (D-S) MOSFET; Manufacturer: TECH PUBLIC; Manufacturer Part Number: SI2302CDS; ComponentLink1Description: LCSC; ComponentLink1URL: https://www.lcsc.com/product-detail/MOSFETs_TECH-PUBLIC-SI2302CDS_C5310968.html; Package: SOT-23; LCSC Part Number: C5310968; Item Type: Mosfet
footprint Sot-23 (TRANS NPN 40V 0.6A SOT23)
pins: 1 G, 2 S, 3 D

## SI2309CDS-T1-E3
designator Q?
MOSFET P-CH 60V 1.6A SOT23-3; Manufacturer: Vishay Siliconix; Manufacturer Part Number: SI2309CDS-T1-E3; Item Type: MOSFETs; Rise Time: 35ns; Rds On Max: 345mR; Input Capacitance: 210pF; Continuous Drain Current (ID): 1.2A; Max Power Dissipation: 1.7W; Gate to Source Voltage (Vgs): 20V; Turn-Off Delay Time: 15ns; Turn-On Delay Time: 40ns; Number of Channels: 1; Polarity: P-CHANNEL; Power Dissipation: 1W; Threshold Voltage: -1V; Supplier: Mouser; LCSC Part Number: C553975; RoHS: Yes; Stock: 57582; Pricing: 1=0.53, 10=0.453, 50=0.453, 100=0.316, 1000=0.2, 10000=0.157 (USD); Mounting Technology: Surface Mount; Case/Package: SOT-23-3; Pins: 3; Weight: 0.050717oz; Min Operating Temperature: -55°C; Max Operating Temperature: 150°C; Packaging: Tape and Reel; Package Quantity: 3000; Drain to Source Voltage (Vdss): 60V; Drain to Source Resistance: 345mR; Fall Time: 35ns; Series: TrenchFET®; Drain-source On Resistance-Max: 345mR; Length: 3.04mm; Width: 1.4mm; Height: 1.02mm; Radiation Hardening: No; Lead Free: Lead Free; RoHS Compliant: Yes; ComponentLink1URL: https://datasheet.ciiva.com/16217/si2309cd-16217597.pdf?src-supplier=Future+Electronics; ComponentLink1Description: https://datasheet.ciiva.com/16217/si2309cd-16217597.pdf?src-supplier=Future+Electronics; ComponentLink2URL: https://datasheet.ciiva.com/29742/si2309cd-29742879.pdf?src-supplier=Digikey; ComponentLink2Description: https://datasheet.ciiva.com/29742/si2309cd-29742879.pdf?src-supplier=Digikey
footprint SOT-23 (TRANS NPN 40V 0.6A SOT23)
pins: 1 G, 2 S, 3 D

## SI2310-HXY
designator Q?
60V 3A 1.7W 86mΩ@10V,3A N Channel SOT-23(TO-236) MOSFETs ROHS; Manufacturer: HXY; Manufacturer Part Number: SI2310-HXY; Item Type: Mosfet; Package: SOT-23(TO-236); LCSC Part Number: C4748716; ComponentLink1Description: LCSC; ComponentLink1URL: https://www.lcsc.com/product-detail/MOSFETs_span-style-background-color-ff0-HXY-span-MOSFET-SI2310-HXY_C4748716.html
footprint SOT-23 (TRANS NPN 40V 0.6A SOT23)
pins: 1 G, 2 S, 3 D

## SI2312BDS-T1-BE3
designator Q?
N-CHANNEL 20-V (D-S) MOSFET; Manufacturer: Vishay; Manufacturer Part Number: SI2312BDS-T1-BE3; Supplier: Mouser; Supplier Part Number: 78-SI2312BDS-T1-BE3; RoHS: Yes; Category: LDO; Stock: 345886; Pricing: 1=0.58, 10=0.493, 50=0.493, 100=0.368, 1000=0.231, 10000=0.192 (USD); Item Type: Mosfet
footprint SOT-23 (TRANS NPN 40V 0.6A SOT23)
pins: 1 G, 2 S, 3 D

## SI2319DS-T1-E3
designator Q?
MOSFET P-CH 40V 2.3A SOT23-3; Manufacturer: Vishay Siliconix; Manufacturer Part Number: SI2319DS-T1-E3; Item Type: MOSFETs; Drain to Source Breakdown Voltage: -40V; Supplier: Mouser; LCSC Part Number: C727531; RoHS: Yes; Stock: 200176; Pricing: 1=0.55, 10=0.466, 50=0.466, 100=0.359, 1000=0.296, 10000=0.237 (USD); Lead Free: 5697LeadFree; ComponentLink1URL: https://datasheet.ciiva.com/28599/1749956-28599616.pdf?src-supplier=Element14; ComponentLink1Description: https://datasheet.ciiva.com/28599/1749956-28599616.pdf?src-supplier=Element14; ComponentLink2URL: https://datasheet.ciiva.com/16486/72315-16486091.pdf?src-supplier=Future+Electronics; ComponentLink2Description: https://datasheet.ciiva.com/16486/72315-16486091.pdf?src-supplier=Future+Electronics; ComponentLink3URL: https://datasheet.ciiva.com/7788/72315-7788760.pdf?src-supplier=Element14; ComponentLink3Description: https://datasheet.ciiva.com/7788/72315-7788760.pdf?src-supplier=Element14; ComponentLink4URL: https://datasheet.ciiva.com/932/72315-932453.pdf?src-supplier=Digikey; ComponentLink4Description: https://datasheet.ciiva.com/932/72315-932453.pdf?src-supplier=Digikey; ComponentLink5URL: https://datasheet.ciiva.com/932/72315-932454.pdf?src-supplier=Digikey; ComponentLink5Description: https://datasheet.ciiva.com/932/72315-932454.pdf?src-supplier=Digikey; ComponentLink6URL: https://datasheet.ciiva.com/932/72315-932455.pdf?src-supplier=Digikey; ComponentLink6Description: https://datasheet.ciiva.com/932/72315-932455.pdf?src-supplier=Digikey; ComponentLink7URL: https://datasheet.ciiva.com/11161/72315-11161455.pdf?src-supplier=Avnet; ComponentLink7Description: https://datasheet.ciiva.com/11161/72315-11161455.pdf?src-supplier=Avnet
footprint SOT-23 (TRANS NPN 40V 0.6A SOT23)
pins: 1 G, 2 S, 3 D

## SI2323DS
designator Q?
SOT-23-3 MOSFETs ROHS; Manufacturer: TECH PUBLIC; Manufacturer Part Number: SI2323DS; Item Type: Mosfet; Package: SOT-23-3; LCSC Part Number: C5182044; ComponentLink1Description: LCSC; ComponentLink1URL: https://www.lcsc.com/product-detail/MOSFETs_TECH-PUBLIC-SI2323DS_C5182044.html
footprint SOT-23 (TRANS NPN 40V 0.6A SOT23)
pins: 1 G, 2 S, 3 D